# Altium footprint library XC6206P332MR-G_C5446.PcbLib: 1 footprints
Each footprint in its own frame and in the unit in brackets; x right, y up, seen from the top. Pads: shape width x height; smd on the part's side, far side on the other; paste and mask are expansions set on the pad; w line width, h text height; cw(c..) or ccw(c..) is an arc to the next point about the centre after c.
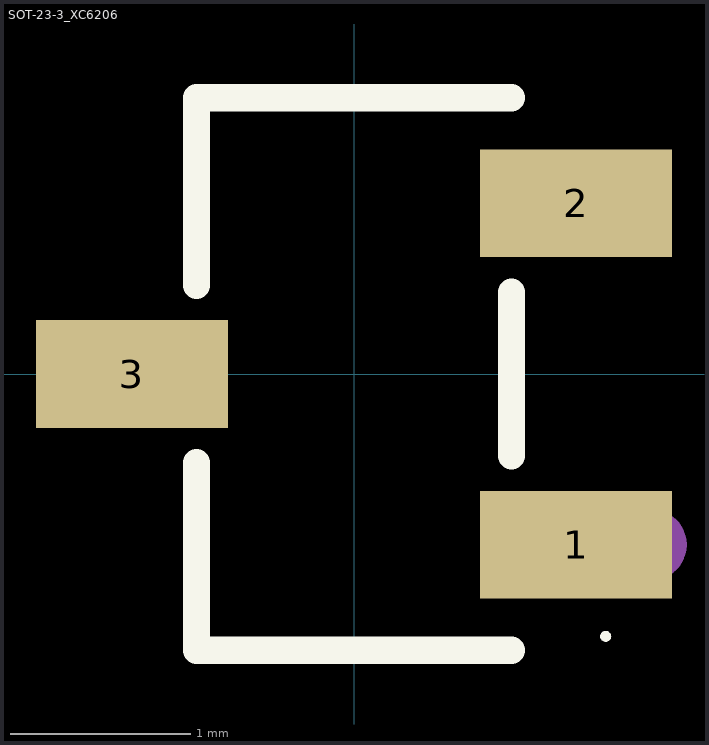
[diagram p0: the footprint, top view; thin cyan lines are the x and y axes]

## SOT-23-3_XC6206 [mm] "3.3V 200mA 6V 输出极性:正极 工作电压:6V 输出电压:3.3V 输出电流:200mA 电源纹波抑制比(PSRR):- 输出类型:固定 型号:XC6206P332MR-G_C5446 LCSC C5446 厂牌:TOREX(特瑞仕)"
height 1
pads (3):
  rect 1.07x0.6 smd mask+0.05: 1(1.235,-0.95) 2(1.235,0.95) 3(-1.235,0)
Top Overlay:
  region: 1.43,-1.46 1.429,-1.454 1.428,-1.449 1.425,-1.443 1.421,-1.439 1.417,-1.435 1.411,-1.432 1.406,-1.431 1.4,-1.43 1.394,-1.431 1.388,-1.432 1.383,-1.435 1.379,-1.439 1.375,-1.443 1.372,-1.449 1.371,-1.454 1.37,-1.46 1.371,-1.466 1.372,-1.471 1.375,-1.477 1.379,-1.481 1.383,-1.485 1.388,-1.488 1.394,-1.489 1.4,-1.49 1.406,-1.489 1.411,-1.488 1.417,-1.485 1.421,-1.481 1.425,-1.477 1.428,-1.471 1.429,-1.466
  lines w0.152: -0.876,-0.495 -0.876,-1.536 0.876,-1.536 ; -0.876,0.495 -0.876,1.536 0.876,1.536 ; 0.876,-0.455 0.876,0.455
Mechanical 2:
  circle w0.2: c1.651,-0.95 r0.1
3D body "SOT-23-3_L2.9-W1.6-P1.90-LS2.8-BR.step": height 1, standoff 0, extent -1.87,-1.636 1.87,1.636